# Altium schematic symbol library MyLib.SchLib: 4 symbols
Pins are listed as number, name and electrical type; pins without a type are passive.

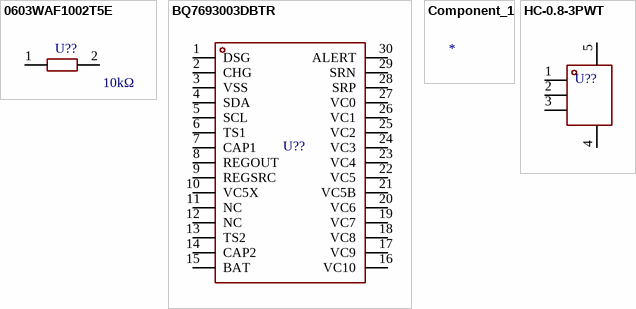
[diagram p0: symbols 0603WAF1002T5E to HC-0.8-3PWT]

## 0603WAF1002T5E
designator U??  value 10kΩ  (hidden comment: 0603WAF1002T5E)
10KΩ (1002) ±1%
footprint R0603
pins: 1, 2

## BQ7693003DBTR
designator U??  (value not drawn)
芯片类型:监测芯片；保护芯片；均衡芯片;工作电压:6V~36V;电池类型:锂电池；磷酸铁锂电池;电池节数:6~10;工作温度:-40℃~+85℃;电池温度检测:支持;静态电流(Iq):40uA;接口类型:I2C;功能特性:过充保护；过流保护；电芯均衡；电池温度监测；过放保护；短路保护;
footprint TSSOP-30_L7.8-W4.4-P0.50-LS6.4-BL
pins: 1 DSG, 2 CHG, 3 VSS, 4 SDA, 5 SCL, 6 TS1, 7 CAP1, 8 REGOUT, 9 REGSRC, 10 VC5X, 11 NC, 12 NC, 13 TS2, 14 CAP2, 15 BAT, 16 VC10, 17 VC9, 18 VC8, 19 VC7, 20 VC6, 21 VC5B, 22 VC5, 23 VC4, 24 VC3, 25 VC2, 26 VC1, 27 VC0, 28 SRP, 29 SRN, 30 ALERT

## Component_1
designator *  (value not drawn)

## HC-0.8-3PWT
designator U??  (value not drawn)
footprint CONN-SMD_3P-P0.80_HCTL_HC-0.8-3PWT
pins: 1, 2, 3, 4, 5